# Altium footprint library USBA3C31DRACS1.PcbLib: 1 footprints
Each footprint in its own frame and in the unit in brackets; x right, y up, seen from the top. Pads: shape width x height; smd on the part's side, far side on the other; paste and mask are expansions set on the pad; w line width, h text height; cw(c..) or ccw(c..) is an arc to the next point about the centre after c.
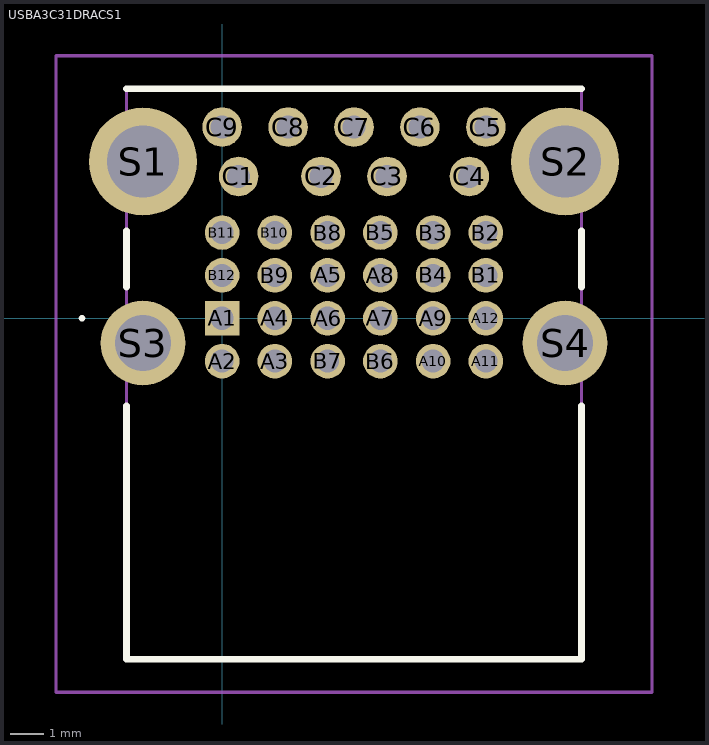
[diagram p0: the footprint, top view; thin cyan lines are the x and y axes]

## USBA3C31DRACS1 [mm]
pads (37):
  rect 1.05x1.05 hole 0.7: A1(0,0)
  round 1.05 hole 0.7: A2(0,-1.3) A3(1.6,-1.3) A4(1.6,0) A5(3.2,1.3) A6(3.2,0) A7(4.8,0) A8(4.8,1.3) A9(6.4,0) A10(6.4,-1.3) A11(8,-1.3) A12(8,0) B1(8,1.3) B2(8,2.6) B3(6.4,2.6) B4(6.4,1.3) B5(4.8,2.6) B6(4.8,-1.3) B7(3.2,-1.3) B8(3.2,2.6) B9(1.6,1.3) B10(1.6,2.6) B11(0,2.6) B12(0,1.3)
  round 1.2 hole 0.7: C1(0.5,4.3) C2(3,4.3) C3(5,4.3) C4(7.5,4.3) C5(8,5.8) C6(6,5.8) C7(4,5.8) C8(2,5.8) C9(0,5.8)
  round 3.27 hole 2.18: S1(-2.4,4.75) S2(10.4,4.75)
  round 2.565 hole 1.71: S3(-2.4,-0.75) S4(10.4,-0.75)
Top Overlay:
  lines w0.1: -4.3,0 ccw(c-4.25,0) -4.2,0 ccw(c-4.25,0) -4.3,0
  lines w0.2: -2.9,-2.65 -2.9,-10.34 10.9,-10.34 10.9,-2.65 ; -2.9,0.95 -2.9,2.65 ; -2.9,6.96 10.9,6.96 ; 10.9,0.95 10.9,2.65
Mechanical 15:
  lines w0.1: -2.9,-10.34 -2.9,6.96 10.9,6.96 10.9,-10.34 -2.9,-10.34
Mechanical 20:
  lines w0.1: -5.035,-11.34 -5.035,7.96 13.035,7.96 13.035,-11.34 -5.035,-11.34
3D body "USB-A3-C31-D-RA-CS1.stp": height 15.84, standoff -2.07, extent -2.911,-10.427 11.039,6.858